# Altium footprint library MyPCBLib.PcbLib: 103 footprints (part 6 of 7)
Each footprint in its own frame and in the unit in brackets; x right, y up, seen from the top. Pads: shape width x height; smd on the part's side, far side on the other; paste and mask are expansions set on the pad; w line width, h text height; cw(c..) or ccw(c..) is an arc to the next point about the centre after c.
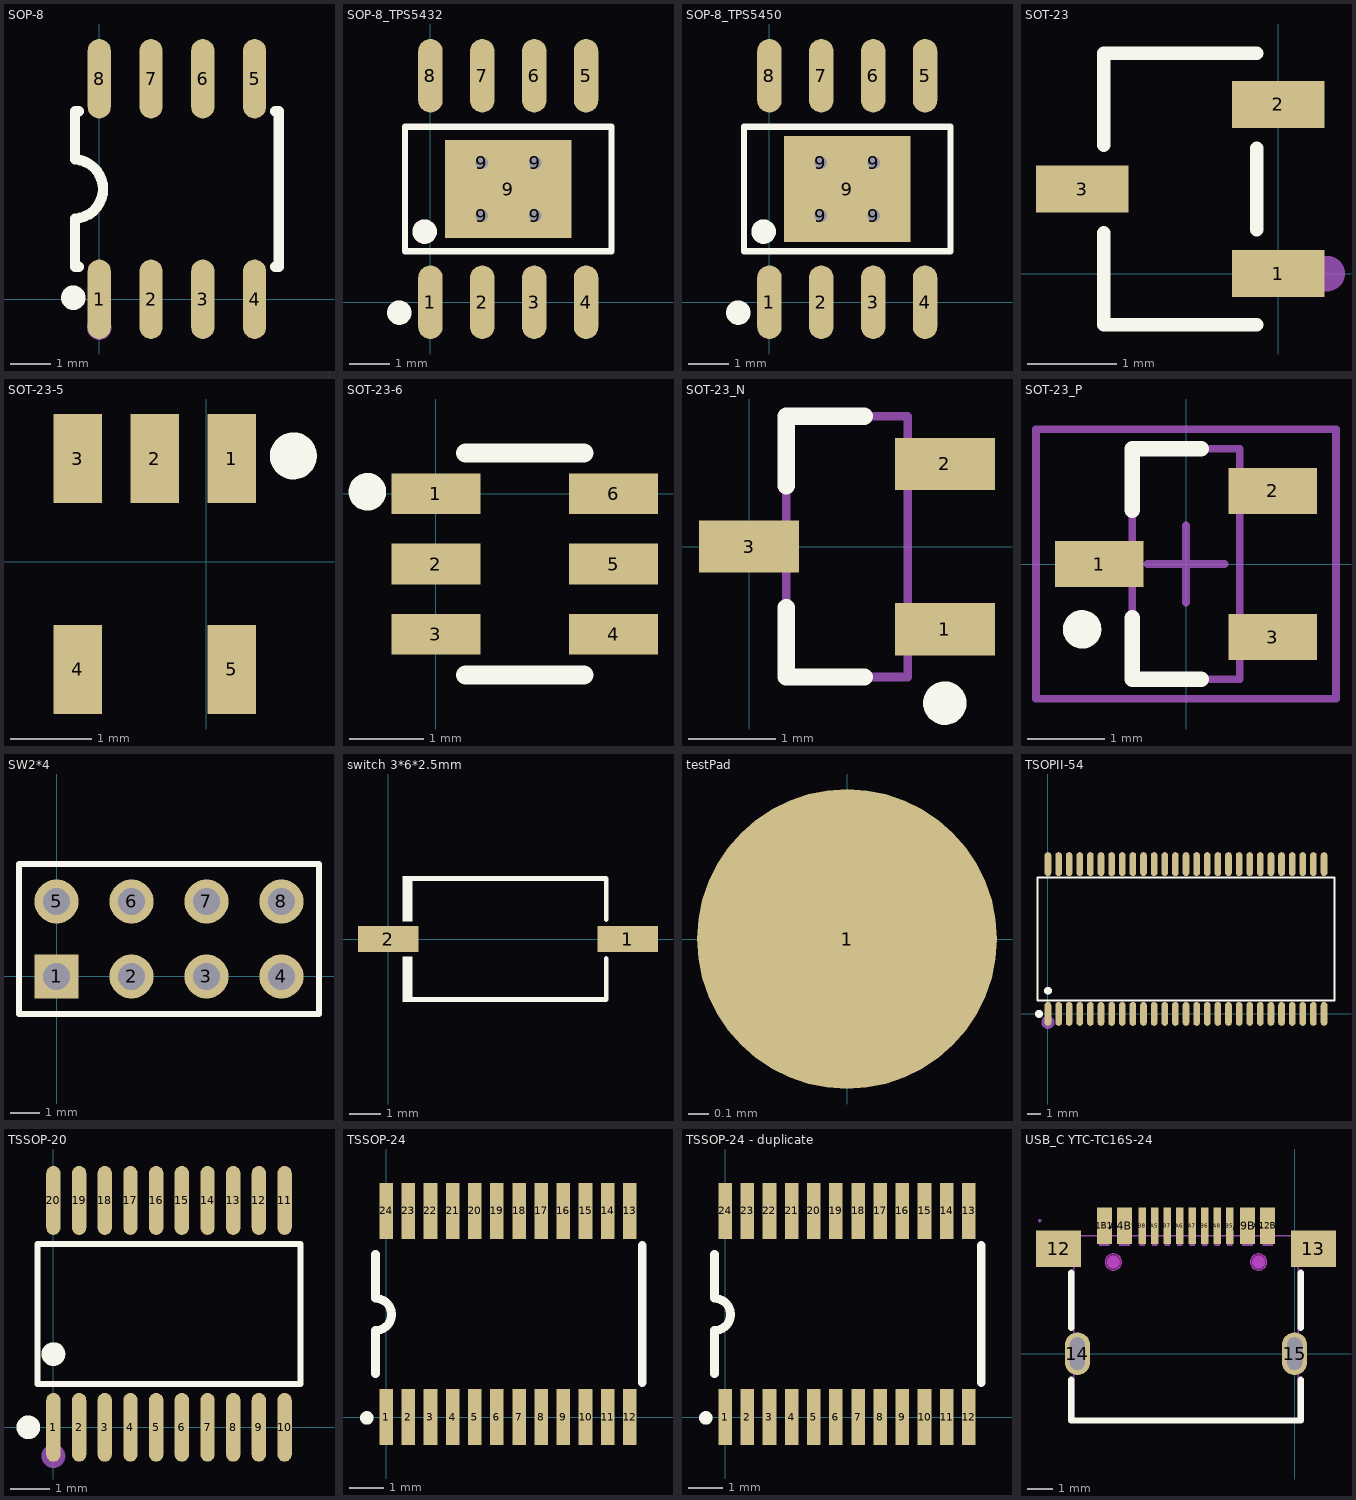
[diagram p5: the footprints below, top view; thin cyan lines are the x and y axes]

## SOP-8 [mil]
pads (8):
  oval 22.38x76.78 smd: 1(0,0) 2(50,0) 3(100,0) 4(150,0) 5(150,213) 6(100,213) 7(50,213) 8(0,213)
Top Overlay:
  circle w11.81: c-25,1.5 r5.91
  lines w10: -23.43,77.89 ccw(c-24.99,106.5) -23.23,135.09 ; -23.43,77.89 -23.43,47.45 -23.43,31.5 -19.83,31.5 ; -23.43,135.09 -23.43,165.56 -23.43,181.5 -19.83,181.5 ; 169.83,31.5 173.43,31.5 173.43,47.45 173.43,165.56 173.43,181.5 169.83,181.5
Mechanical 15:
  circle w11.81: c0,-27.36 r5.91

## SOP-8_TPS5432 [mm]
pads (13):
  oval 0.6x1.8 smd mask+0.051: 1(0,0) 2(1.27,0) 3(2.54,0) 4(3.81,0) 5(3.81,5.545) 6(2.54,5.545) 7(1.27,5.545) 8(0,5.545)
  round 0.61 hole 0.305 paste-2539.97 mask+0.102: 9(1.262,2.113) 9(1.262,3.413) 9(2.562,2.113) 9(2.562,3.413)
  rect 3.1x2.4 smd mask+0.051: 9(1.905,2.772)
Top Overlay:
  circle w0.3: c-0.762,-0.254 r0.15
  circle w0.3: c-0.142,1.729 r0.15
  lines w0.152: -0.621,1.251 4.431,1.251 4.431,4.294 -0.621,4.294 -0.621,1.251

## SOP-8_TPS5450 [mm] "TPS5450DDAR/SOP-8EP/TI"
pads (13):
  oval 0.6x1.8 smd mask+0.051: 1(0,0) 2(1.27,0) 3(2.54,0) 4(3.81,0) 5(3.81,5.545) 6(2.54,5.545) 7(1.27,5.545) 8(0,5.545)
  round 0.61 hole 0.305 paste-2539.97 mask+0.102: 9(1.255,2.118) 9(1.255,3.418) 9(2.555,2.118) 9(2.555,3.418)
  rect 3.1x2.6 smd mask+0.051: 9(1.905,2.772)
Top Overlay:
  circle w0.3: c-0.142,1.729 r0.15
  circle w0.3: c-0.762,-0.254 r0.15
  lines w0.152: -0.621,1.251 -0.621,4.294 4.431,4.294 4.431,1.251 -0.621,1.251

## SOT-23 [mm]
pads (3):
  rect 1.037x0.532 smd: 1(0,0) 2(0,1.9) 3(-2.202,0.95)
Top Overlay:
  lines w0.152: -1.96,0.455 -1.96,-0.576 -0.243,-0.576 ; -1.96,1.445 -1.96,2.476 -0.243,2.476 ; -0.243,0.495 -0.243,1.405
Mechanical 15:
  circle w0.2: c0.549,0 r0.1
3D body "CircuitWorks-SOT-23.sldprt": height 1.05, standoff -0.05, extent -2.351,-0.55 0.149,2.45

## SOT-23-5 [mm]
pads (5):
  rect 0.6x1.1 smd: 1(0.315,1.27) 2(-0.635,1.27) 3(-1.585,1.27) 4(-1.585,-1.33) 5(0.315,-1.33)
Top Overlay:
  circle w0.3: c1.073,1.303 r0.14
3D body "DBV0005A.stp": height 1.2, standoff 0, extent -2.075,-1.41 0.825,1.39

## SOT-23-6 [mm] "SOT23, 6-Leads, Body 2.90x2.80mm, Pitch 0.95mm, IPC Medium Density"
height 1.1
pads (6):
  rect 1.2x0.55 smd paste+0 mask+0.051: 1(0,0) 2(0,-0.95) 3(0,-1.9) 4(2.4,-1.9) 5(2.4,-0.95) 6(2.4,0)
Top Overlay:
  circle w0.254: c-0.925,0.025 r0.127
  lines w0.254: 0.4,-2.45 2,-2.45 ; 0.4,0.55 2,0.55

## SOT-23_N [mm]
pads (3):
  rect 1.15x0.6 smd: 1(2.25,-0.95) 2(2.25,0.95) 3(0,0)
Top Overlay:
  circle w0.25: c2.25,-1.8 r0.125
  lines w0.2: 0.425,-0.7 0.425,-1.5 1.325,-1.5 ; 0.425,0.7 0.425,1.5 1.325,1.5
Mechanical 13:
  lines w0.1: 0.425,-1.5 0.425,1.5 1.825,1.5 1.825,-1.5 0.425,-1.5
3D body: height 1.1, standoff 0, extent 0.425,-1.5 1.825,1.5

## SOT-23_P [mm]
pads (3):
  rect 1.15x0.6 smd: 1(-1.125,0) 2(1.125,0.95) 3(1.125,-0.95)
Top Overlay:
  circle w0.25: c-1.35,-0.85 r0.125
  lines w0.2: -0.7,-0.7 -0.7,-1.5 0.2,-1.5 ; -0.7,0.7 -0.7,1.5 0.2,1.5
Mechanical 13:
  lines w0.1: -0.7,-1.5 0.7,-1.5 0.7,1.5 -0.7,1.5 -0.7,-1.5
Mechanical 15:
  lines w0.1: -0.5,0 0.5,0 ; 0,-0.5 0,0.5 ; -1.95,-1.75 1.95,-1.75 1.95,1.75 -1.95,1.75 -1.95,-1.75
3D body: height 1.1, standoff 0, extent -0.7,-1.5 0.7,1.5

## SW2*4 [mm]
pads (8):
  rect 1.5x1.5 hole 0.9: 1(0,0)
  round 1.5 hole 0.9: 2(2.54,0) 3(5.08,0) 4(7.62,0) 5(0,2.54) 6(2.54,2.54) 7(5.08,2.54) 8(7.62,2.54)
Top Overlay:
  lines w0.2: -1.27,-1.27 -1.27,3.81 8.89,3.81 8.89,-1.27 -1.27,-1.27

## switch 3*6*2.5mm [mm]
pads (2):
  rect 1.92x0.84 smd: 1(7.62,0) 2(0,0)
Top Overlay:
  region: 0.76,2.002 0.76,0.572 0.455,0.572 0.455,2.002
  region: 0.76,-2.002 0.76,-0.572 0.455,-0.572 0.455,-2.002
  lines w0.152: 0.684,-1.926 6.936,-1.926 6.936,-0.623 ; 0.684,1.926 6.936,1.926 6.936,0.623

## testPad [mm]
pads (1):
  round 1.5 smd: 1(0,0)

## TSOPII-54 [mil]
pads (54):
  oval 19.7x70.9 smd mask+2: 1(0,0) 2(31.5,0) 3(62.9,0) 4(94.4,0) 5(125.9,0) 6(157.4,0) 7(188.9,0) 8(220.4,0) 9(251.9,0) 10(283.4,0) 11(314.9,0) 12(346.4,0) 13(377.9,0) 14(409.4,0) 15(440.9,0) 16(472.4,0) 17(503.9,0) 18(535.4,0) 19(566.9,0) 20(598.4,0) 21(629.9,0) 22(661.4,0) 23(692.9,0) 24(724.4,0) 25(755.9,0) 26(787.4,0) 27(818.9,0) 28(818.9,444.2) 29(787.4,444.2) 30(755.9,444.2) 31(724.4,444.2) 32(692.9,444.2) 33(661.4,444.2) 34(629.9,444.2) 35(598.4,444.2) 36(566.9,444.2) 37(535.4,444.2) 38(503.9,444.2) 39(472.4,444.2) 40(440.9,444.2) 41(409.4,444.2) 42(377.9,444.2) 43(346.4,444.2) 44(314.9,444.2) 45(283.4,444.2) 46(251.9,444.2) 47(220.4,444.2) 48(188.9,444.2) 49(157.4,444.2) 50(125.9,444.2) 51(94.4,444.2) 52(62.9,444.2) 53(31.5,444.2) 54(0,444.2)
Top Overlay:
  circle w11.8: c-26.7,0 r5.9
  circle w11.8: c0,68.6 r5.9
  lines w6: -31,39 849.8,39 849.8,405.2 -31,405.2 -31,39
Mechanical 6:
  circle w19.7: c0,-25.1 r9.8

## TSSOP-20 [mm]
pads (20):
  oval 0.364x1.742 smd: 1(0,0) 2(0.65,0) 3(1.3,0) 4(1.95,0) 5(2.6,0) 6(3.25,0) 7(3.9,0) 8(4.55,0) 9(5.2,0) 10(5.85,0) 11(5.85,5.742) 12(5.2,5.742) 13(4.55,5.742) 14(3.9,5.742) 15(3.25,5.742) 16(2.6,5.742) 17(1.95,5.742) 18(1.3,5.742) 19(0.65,5.742) 20(0,5.742)
Top Overlay:
  circle w0.3: c0,1.852 r0.15
  circle w0.3: c-0.634,0 r0.15
  lines w0.152: -0.401,1.1 -0.401,4.642 6.251,4.642 6.251,1.1 -0.401,1.1
Mechanical 15:
  circle w0.3: c0,-0.729 r0.15
3D body "User Library-tssop-20-1.sldprt": height 1.2, standoff 0, extent -0.375,-0.429 6.225,6.171

## TSSOP-24 [mm]
pads (24):
  rect 0.4x1.65 smd paste+0 mask+0.051: 1(0,0) 2(0.65,0) 3(1.3,0) 4(1.95,0) 5(2.6,0) 6(3.25,0) 7(3.9,0) 8(4.55,0) 9(5.2,0) 10(5.85,0) 11(6.5,0) 12(7.15,0) 13(7.15,6.045) 14(6.5,6.045) 15(5.85,6.045) 16(5.2,6.045) 17(4.55,6.045) 18(3.9,6.045) 19(3.25,6.045) 20(2.6,6.045) 21(1.95,6.045) 22(1.3,6.045) 23(0.65,6.045) 24(0,6.045)
Top Overlay:
  circle w0.2: c-0.565,-0.025 r0.1
  lines w0.254: -0.311,1.27 -0.311,2.54 ccw(c-0.311,3.01) -0.311,3.48 ; -0.311,3.505 -0.311,4.775 ; 7.512,1.015 7.512,5.03

## TSSOP-24 - duplicate [mm]
pads (24):
  rect 0.4x1.65 smd: 1(0,0) 2(0.65,0) 3(1.3,0) 4(1.95,0) 5(2.6,0) 6(3.25,0) 7(3.9,0) 8(4.55,0) 9(5.2,0) 10(5.85,0) 11(6.5,0) 12(7.15,0) 13(7.15,6.045) 14(6.5,6.045) 15(5.85,6.045) 16(5.2,6.045) 17(4.55,6.045) 18(3.9,6.045) 19(3.25,6.045) 20(2.6,6.045) 21(1.95,6.045) 22(1.3,6.045) 23(0.65,6.045) 24(0,6.045)
Top Overlay:
  circle w0.2: c-0.565,-0.025 r0.1
  lines w0.254: -0.311,1.27 -0.311,2.54 ccw(c-0.311,3.01) -0.311,3.48 ; -0.311,3.505 -0.311,4.775 ; 7.512,1.015 7.512,5.03

## USB_C YTC-TC16S-24 [mm]
pads (16):
  rect 1.8x1.45 smd paste-100 mask+0.05: 12(-9.39,4.18) 13(0.75,4.18)
  oval 1x1.7 hole 0.6 slot 1.3 at 90 deg paste-2539.97 mask+0.05: 14(-8.64,0) 15(0,0)
  rect 0.6x1.45 smd paste-100 mask+0.05: A1B12(-7.57,5.095) A4B9(-6.77,5.095) A9B4(-1.87,5.095) A12B1(-1.07,5.095)
  rect 0.3x1.45 smd paste-100 mask+0.05: A5(-5.57,5.095) A6(-4.57,5.095) A7(-4.07,5.095) A8(-3.07,5.095) B5(-2.57,5.095) B6(-3.57,5.095) B7(-5.07,5.095) B8(-6.07,5.095)
Top Overlay:
  lines w0.254: -8.892,-1.036 -8.892,-2.66 0.252,-2.66 0.252,-1.036 ; -8.892,1.036 -8.892,3.224 ; 0.252,1.036 0.252,3.224
Top Paste:
  drawing of 16 lines, arcs and shapes, not listed
Keep-Out Layer:
  board cut-out: -1.105,3.65 -1.105,3.715 -1.154,3.834 -1.246,3.925 -1.365,3.975 -1.494,3.975 -1.614,3.925 -1.705,3.834 -1.755,3.715 -1.755,3.65 -1.755,3.585 -1.705,3.466 -1.614,3.374 -1.494,3.325 -1.365,3.325 -1.246,3.374 -1.154,3.466 -1.105,3.585
  board cut-out: -6.885,3.649 -6.885,3.714 -6.934,3.833 -7.026,3.925 -7.145,3.974 -7.275,3.974 -7.394,3.925 -7.485,3.833 -7.535,3.714 -7.535,3.649 -7.535,3.585 -7.485,3.465 -7.394,3.374 -7.275,3.324 -7.145,3.324 -7.026,3.374 -6.934,3.465 -6.885,3.585
Mechanical 1:
  circle w0.005: c-1.43,3.65 r0.325
  circle w0.005: c-7.21,3.649 r0.325
Mechanical 6:
  circle w0.254: c-1.43,3.65 r0.127
  circle w0.254: c-7.21,3.649 r0.127
Mechanical 15:
  region: -8.79,0.4 -8.49,0.4 -8.49,-0.4 -8.79,-0.4
  region: -0.15,0.4 0.15,0.4 0.15,-0.4 -0.15,-0.4
  region: 0,4.7 1.5,4.7 1.5,3.65 0,3.65
  region: -10.14,4.7 -8.64,4.7 -8.64,3.65 -10.14,3.65
  region: -6.17,5.3 -5.97,5.3 -5.97,4.3 -6.17,4.3
  region: -5.67,5.3 -5.47,5.3 -5.47,4.3 -5.67,4.3
  region: -5.17,5.3 -4.97,5.3 -4.97,4.3 -5.17,4.3
  region: -4.67,5.3 -4.47,5.3 -4.47,4.3 -4.67,4.3
  region: -4.17,5.3 -3.97,5.3 -3.97,4.3 -4.17,4.3
  region: -3.67,5.3 -3.47,5.3 -3.47,4.3 -3.67,4.3
  region: -3.17,5.3 -2.97,5.3 -2.97,4.3 -3.17,4.3
  region: -2.67,5.3 -2.47,5.3 -2.47,4.3 -2.67,4.3
  region: -7.775,5.3 -7.365,5.3 -7.365,4.3 -7.775,4.3
  region: -6.975,5.3 -6.565,5.3 -6.565,4.3 -6.975,4.3
  region: -1.275,5.3 -0.865,5.3 -0.865,4.3 -1.275,4.3
  region: -2.075,5.3 -1.665,5.3 -1.665,4.3 -2.075,4.3
  region: -10.08,5.3 -10.08,5.325 -10.115,5.36 -10.165,5.36 -10.2,5.325 -10.2,5.3 -10.2,5.276 -10.165,5.24 -10.115,5.24 -10.08,5.276
  lines w0.051: -8.79,-2.6 0.15,-2.6 0.15,4.7 -8.79,4.7 -8.79,-2.6